# Altium footprint library custom-case.PcbLib: 342 footprints (part 14 of 22)
Each footprint in its own frame and in the unit in brackets; x right, y up, seen from the top. Pads: shape width x height; smd on the part's side, far side on the other; paste and mask are expansions set on the pad; w line width, h text height; cw(c..) or ccw(c..) is an arc to the next point about the centre after c.
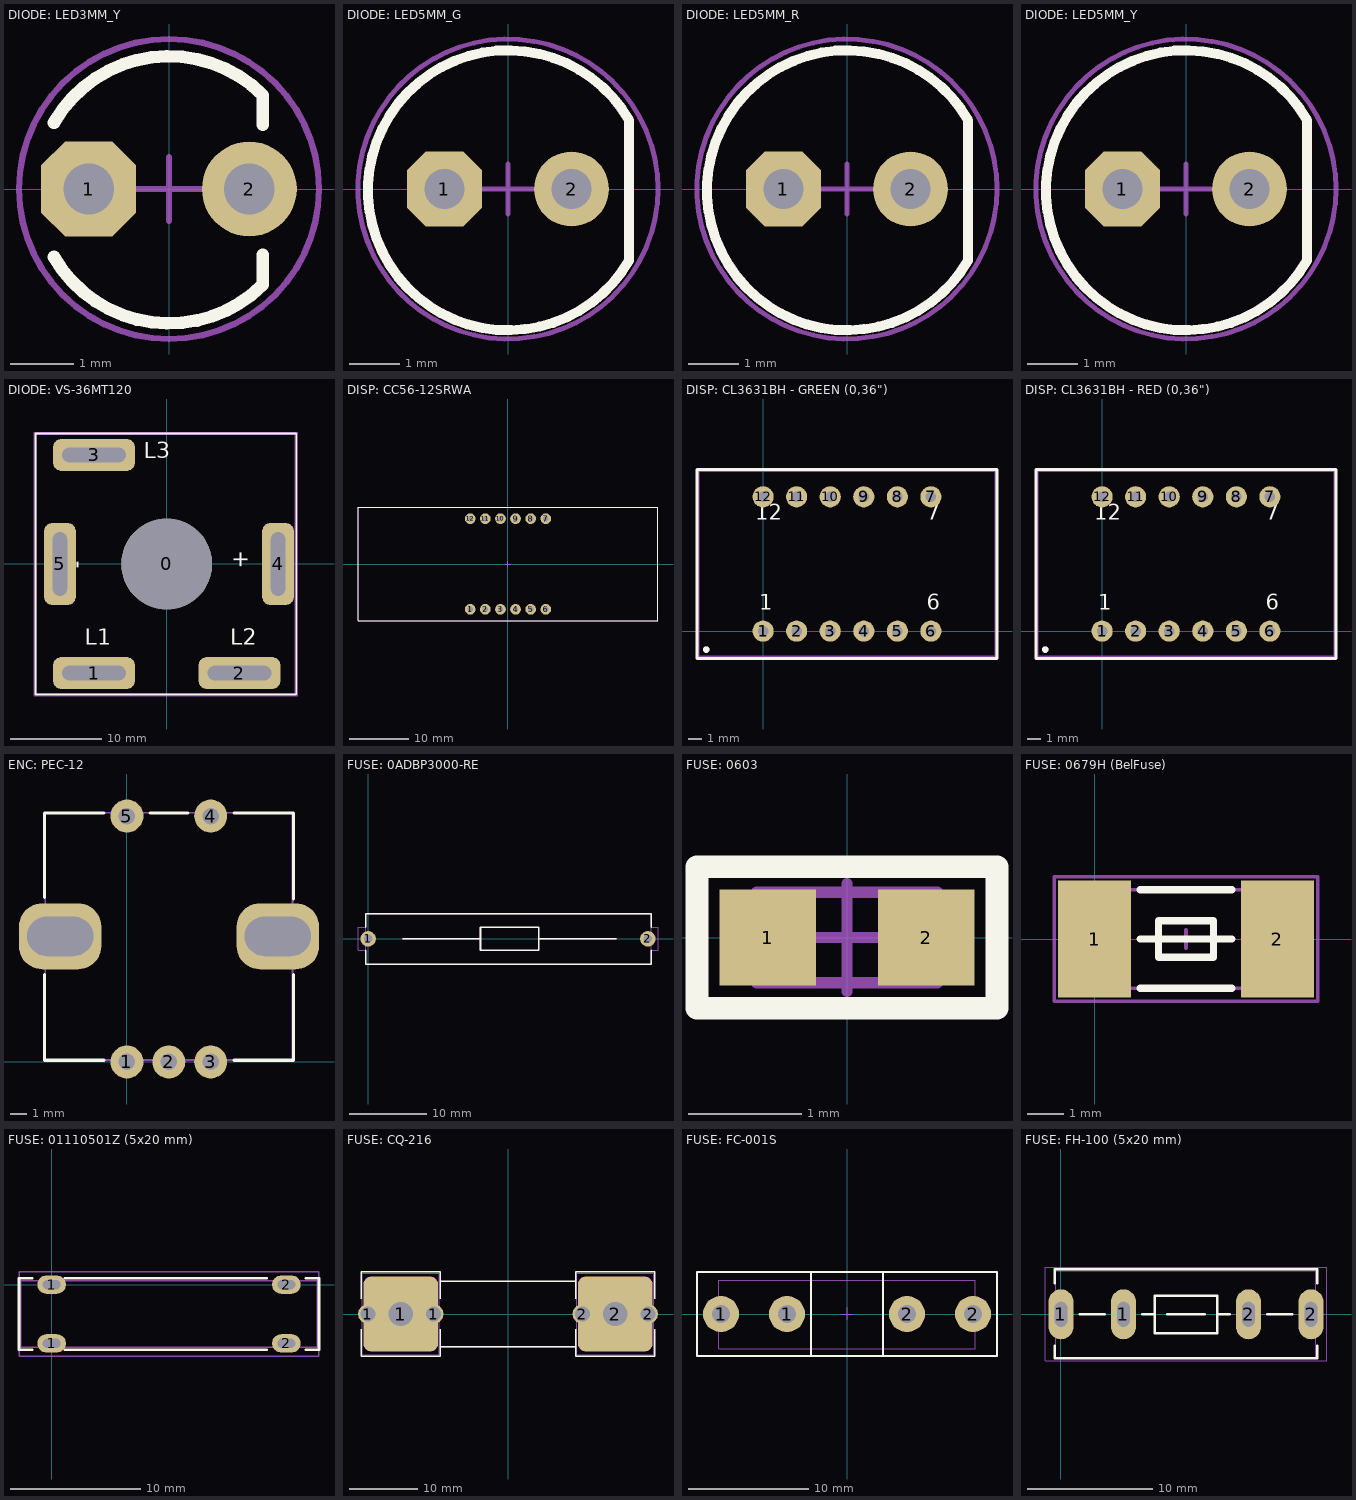
[diagram p13: the footprints below, top view; thin cyan lines are the x and y axes]

## DIODE: LED3MM_Y [mm] "Yellow Leaded Led, 3 mm"
height 12
pads (2):
  oct 1.5x1.5 hole 0.8: 1(-1.27,0)
  round 1.5 hole 0.8: 2(1.27,0)
Top Overlay:
  lines w0.2: 1.485,-1.51 cw(c0,-0.025) -1.819,-1.075 ccw(c0,-0.025) 1.485,-1.51 ; 1.485,-1.51 1.485,-1.04 1.485,-1.51 ; 1.485,1.485 ccw(c0,0) -1.819,1.05 cw(c0,0) 1.485,1.485 ; 1.485,1.485 1.485,1.015 1.485,1.485
Top Assy:
  circle w0.1: c0,0 r2.372
Size Area:
  circle w0.1: c0,0 r2.372
  lines w0.1: -0.5,0 0.5,0 ; 0,-0.5 0,0.5
3D body "3mm_led_yell.STEP": height 12, standoff -1, extent -2,-2 2,2

## DIODE: LED5MM_G [mm] "Green Leaded Led, 5 mm"
height 12
pads (2):
  oct 1.5x1.5 hole 0.8: 1(-1.27,0)
  round 1.5 hole 0.8: 2(1.27,0)
Top Overlay:
  lines w0.2: 2.425,-1.425 cw(c0,-0.025) 2.425,1.375 2.425,-1.425
Top Assy:
  circle w0.1: c0,0 r3
Size Area:
  circle w0.1: c0,0 r3
  lines w0.1: -0.5,0 0.5,0 ; 0,-0.5 0,0.5
3D body "5mm_led_grn.STEP": height 14.5, standoff -1, extent -3,-3 3,3

## DIODE: LED5MM_R [mm] "Red Leaded Led, 5 mm"
height 12
pads (2):
  oct 1.5x1.5 hole 0.8: 1(-1.27,0)
  round 1.5 hole 0.8: 2(1.27,0)
Top Overlay:
  lines w0.2: 2.425,-1.425 cw(c0,-0.025) 2.425,1.375 2.425,-1.425
Top Assy:
  circle w0.1: c0,0 r3
Size Area:
  circle w0.1: c0,0 r3
  lines w0.1: -0.5,0 0.5,0 ; 0,-0.5 0,0.5
3D body "5mm_led_red.STEP": height 14.5, standoff -1, extent -3,-3 3,3

## DIODE: LED5MM_Y [mm] "Yellow Leaded Led, 5 mm"
height 12
pads (2):
  oct 1.5x1.5 hole 0.8: 1(-1.27,0)
  round 1.5 hole 0.8: 2(1.27,0)
Top Overlay:
  lines w0.2: 2.425,-1.425 cw(c0,-0.025) 2.425,1.375 2.425,-1.425
Top Assy:
  circle w0.1: c0,0 r3
Size Area:
  circle w0.1: c0,0 r3
  lines w0.1: -0.5,0 0.5,0 ; 0,-0.5 0,0.5
3D body "5mm_led_yell.STEP": height 14.5, standoff -1, extent -3,-3 3,3

## DIODE: VS-36MT120 [mm]
pads (6):
  round 10 hole 10: 0(0,0)
  rrect50% 9x3.5 hole 1.6 slot 7 at 0 deg: 1(-8,-12) 2(8,-12) 3(-8,12)
  rrect50% 3.5x9 hole 1.6 slot 7 at 90 deg: 4(12.25,0) 5(-11.75,0)
Top Overlay:
  lines w0.2: -14.45,-14.35 14.25,-14.35 14.25,14.35 -14.45,14.35 -14.45,-14.35
  text "L1" at -9,-9.5 h3
  text "L3" at -2.5,11 h3
  text "L2" at 7,-9.5 h3
  text "+" at 9.5,-0.5 h3
  text "-" at -8.5,-0.5 h3
Top Assy:
  lines w0.1: -14.35,-14.25 -14.35,14.25 14.15,14.25 14.15,-14.25 -14.35,-14.25
Size Area:
  lines w0.1: -14.6,-14.5 -14.6,14.5 14.4,14.5 14.4,-14.5 -14.6,-14.5
3D body "D-63.stp": height 16, standoff -6, extent -14.35,-14.25 14.15,14.25

## DISP: CC56-12SRWA [mm]
height 8.1
pads (12):
  round 1.8 hole 0.9: 1(-6.35,-7.62) 2(-3.81,-7.62) 3(-1.27,-7.62) 4(1.27,-7.62) 5(3.81,-7.62) 6(6.35,-7.62) 7(6.35,7.62) 8(3.81,7.62) 9(1.27,7.62) 10(-1.27,7.62) 11(-3.81,7.62) 12(-6.35,7.62)
Top Overlay:
  lines w0.2: -25.2,-9.5 -25.2,9.5 25.2,9.5 25.2,-9.5 -25.2,-9.5
Top Assy:
  lines w0.1: -25.2,-9.5 -25.2,9.5 25.2,9.5 25.2,-9.5 -25.2,-9.5
Size Area:
  lines w0.1: -0.5,0 0.5,0 ; 0,-0.5 0,0.5 ; -25.2,-9.5 25.2,-9.5 25.2,9.5 -25.2,9.5 -25.2,-9.5
3D body "User Library-C-564 (7 segment 4 digit LED display).STEP": height 8, standoff -6.2, extent -25.2,-9.5 25.2,9.5

## DISP: CL3631BH - GREEN (0,36") [mm]
pads (14):
  round 1.6 hole 0.8: 1(0,0) 2(2.54,0) 3(5.08,0) 4(7.62,0) 5(10.16,0) 6(12.7,0) 7(12.7,10.16) 8(10.16,10.16) 9(7.62,10.16) 10(5.08,10.16) 11(2.54,10.16) 12(0,10.16)
  round 0.5 on Mech1: ""(-4.3,-1.4)
  round 0.5 on Top Overlay: ""(-4.3,-1.4)
Top Overlay:
  lines w0.2: -5,-2.075 -5,12.225 17.7,12.225 17.7,-2.075 -5,-2.075
  text "1" at -0.3,1.2 h2
  text "6" at 12.4,1.2 h2
  text "7" at 12.4,8 h2
  text "12" at -0.6,8 h2
Top Assy:
  lines w0.1: -4.85,-1.92 -4.85,12.08 17.55,12.08 17.55,-1.92 -4.85,-1.92
Size Area:
  lines w0.1: -4.95,-2.025 -4.95,12.175 17.65,12.175 17.65,-2.025 -4.95,-2.025
3D body "User Library-3631_Green_jam.STEP": height 7.1, standoff -5.5, extent -4.85,-1.92 17.55,12.08

## DISP: CL3631BH - RED (0,36") [mm]
pads (14):
  round 1.6 hole 0.8: 1(0,0) 2(2.54,0) 3(5.08,0) 4(7.62,0) 5(10.16,0) 6(12.7,0) 7(12.7,10.16) 8(10.16,10.16) 9(7.62,10.16) 10(5.08,10.16) 11(2.54,10.16) 12(0,10.16)
  round 0.5 on Mech1: ""(-4.3,-1.4)
  round 0.5 on Top Overlay: ""(-4.3,-1.4)
Top Overlay:
  lines w0.2: -5,-2.075 17.7,-2.075 17.7,12.225 -5,12.225 -5,-2.075
  text "12" at -0.6,8 h2
  text "7" at 12.4,8 h2
  text "6" at 12.4,1.2 h2
  text "1" at -0.3,1.2 h2
Top Assy:
  lines w0.1: -4.85,-1.92 17.55,-1.92 17.55,12.08 -4.85,12.08 -4.85,-1.92
Size Area:
  lines w0.1: -4.95,-2.025 17.65,-2.025 17.65,12.175 -4.95,12.175 -4.95,-2.025
3D body "User Library-3631_Red_jam.STEP": height 7.1, standoff -5.5, extent -4.85,-1.92 17.55,12.08

## ENC: PEC-12 [mm]
pads (7):
  round 2 hole 1: 1(0,0) 2(2.54,0) 3(5.08,0) 4(5.08,14.922) 5(0,14.922)
  rrect70% 5x4 hole 2.4 slot 4 at 0 deg: ""(-4.05,7.625) ""(9.15,7.625)
Top Overlay:
  lines w0.2: -5,5.3 -5,0.1 -1.4,0.1 ; -5,10 -5,15.1 -1.4,15.1 ; 1.4,15.1 3.7,15.1 ; 6.5,0.1 10.1,0.1 10.1,5.3 ; 6.5,15.1 10.1,15.1 10.1,9.9
Top Assy:
  lines w0.1: -4.966,0.12 10.046,0.12 10.046,15.12 -4.966,15.12 -4.966,0.12
3D body "User Library-rotacijski enkoder.STEP": height 16.5, standoff -4.53, extent -4.964,0.12 10.044,15.12

## FUSE: 0ADBP3000-RE [mm]
pads (2):
  round 2 hole 1.1: 1(0,0) 2(36.1,0)
Top Overlay:
  lines w0.2: -0.31,-1.5 -0.31,-3.3 36.51,-3.3 36.51,-1.5 ; -0.31,1.5 -0.31,3.25 36.51,3.25 36.51,1.5 ; 4.5,0 14.5,0 ; 22,0 32,0 ; 14.5,0 14.5,-1.5 22,-1.5 22,1.5 14.5,1.5 14.5,0
Top Assy:
  lines w0.1: 4.5,0 14.5,0 ; 22,0 32,0 ; 14.5,0 14.5,1.5 22,1.5 22,-1.5 14.5,-1.5 14.5,0 ; -0.31,-3.3 -0.31,3.25 36.51,3.25 36.51,-3.3 -0.31,-3.3
Size Area:
  lines w0.1: -1.3,-1.5 -0.31,-1.5 -0.31,-3.3 36.51,-3.3 36.51,-1.5 37.4,-1.5 37.4,1.5 36.51,1.5 36.51,3.25 -0.31,3.25 -0.31,1.5 -1.3,1.5 -1.3,-1.5
3D body "fuse.STEP": height 6.78, standoff -1.8, extent -0.31,-3.3 36.51,3.25

## FUSE: 0603 [mm]
pads (2):
  rect 0.85x0.85 smd: 1(-0.7,0) 2(0.7,0)
Top Overlay:
  lines w0.2: -1.325,-0.625 1.325,-0.625 1.325,0.625 -1.325,0.625 -1.325,-0.625
Top Assy:
  lines w0.1: -0.8,-0.4 0.8,-0.4 0.8,0.4 -0.8,0.4 -0.8,-0.4
Size Area:
  lines w0.1: -0.475,0 0.475,0 ; 0,-0.475 0,0.475 ; -1.325,-0.65 -1.325,0.625 1.325,0.625 1.325,-0.65 -1.325,-0.65
3D body "User Library-MF-FSMF020X_FUSE0603.STEP": height 0.53, standoff 0, extent -0.825,-0.425 0.825,0.425

## FUSE: 0679H (BelFuse) [mm]
pads (2):
  rect 2x3.2 smd mask+0.075: 1(0,0) 2(5,0)
Top Overlay:
  lines w0.2: 1.25,-1.35 3.75,-1.35 ; 1.25,0 3.75,0 ; 1.25,1.35 3.75,1.35 ; 1.75,-0.5 1.75,0.5 3.25,0.5 3.25,-0.5 1.75,-0.5
Top Assy:
  lines w0.1: -0.55,-1.35 -0.55,1.35 5.55,1.35 5.55,-1.35 -0.55,-1.35
Size Area:
  lines w0.1: 2.25,0 2.75,0 ; 2.5,-0.25 2.5,0.25 ; -1.1,-1.7 6.1,-1.7 6.1,1.7 -1.1,1.7 -1.1,-1.7
3D body "User Library-fuse smd.STEP": height 2.69, standoff 0, extent -0.55,-1.35 5.55,1.34

## FUSE: 01110501Z (5x20 mm) [mm]
pads (4):
  oval 2.2x1.4 hole 0.7 slot 1.35 at 0 deg: 1(0,-4.5) 1(0,0) 2(18,-4.5) 2(18,0)
Top Overlay:
  lines w0.2: -1.5,-5 -2.5,-5 -2.5,0.5 -1.5,0.5 ; 1,-5 16.5,-5 ; 1,0.5 16.5,0.5 ; 19.5,-5 20.5,-5 20.5,0.5 19.5,0.5
Top Assy:
  lines w0.1: 20.35,-4.8 -2.35,-4.8 -2.35,0.3 20.35,0.3 ; 20.35,-4.8 20.35,0.3 ; 20.35,-4.8 20.35,-4.8 ; 20.35,0.3 20.35,0.3
Size Area:
  lines w0.1: -2.5,-5.5 20.5,-5.5 20.5,1 -2.5,1 -2.5,-5.5
3D body "User Library-FUSIVEL.STEP": height 8.5, standoff 3.5, extent -1,-4.7 19,0.3
3D body "01110501Z.STEP": height 7.25, standoff -3.1, extent 15.55,-4.8 20.35,0.3
3D body "01110501Z.STEP": height 7.25, standoff -3.1, extent -2.35,-4.8 2.45,0.3

## FUSE: CQ-216 [mm]
pads (6):
  round 2.9 hole 2.2: 1(-20.65,0) 1(-10.95,0) 2(10.95,0) 2(20.65,0)
  rrect20% 11x11 / inner round 5.5 / far side round 5.5 hole 3.6: 1(-15.8,0) 2(15.8,0)
Top Overlay:
  lines w0.2: -21.65,-2.25 -21.65,-6.2 -9.95,-6.2 -9.95,-2.25 ; -21.65,2.25 -21.65,6.2 -9.95,6.2 -9.95,2.25 ; -9.95,-4.8 9.95,-4.8 ; -9.95,4.8 9.95,4.8 ; 9.95,-2.25 9.95,-6.2 21.65,-6.2 21.65,-2.25 ; 9.95,2.25 9.95,6.2 21.65,6.2 21.65,2.25
Mechanical 14:
  lines w0.1: -10.15,-4.8 10.15,-4.8 ; -10.15,4.8 10.15,4.8 ; -21.45,-6 -21.45,6 -10.15,6 -10.15,-6 -21.45,-6 ; 10.15,-6 10.15,6 21.45,6 21.45,-6 10.15,-6
3D body "FUSH_BUSSMANN_1A3400-09.stp": height 18, standoff -3.8, extent 10.25,-5.948 21.35,5.948
3D body "FUSH_BUSSMANN_1A3400-09.stp": height 18, standoff -3.8, extent -21.35,-5.948 -10.25,5.948
3D body "FUSE_10X38_H_Part1.stp": height 17.3, standoff 7, extent -19,-5.15 19,5.15
3D body "FUSE_10X38_H_Part2.stp": height 17, standoff 7.3, extent -9,-4.85 9,4.85

## FUSE: FC-001S [mm]
height 15
pads (4):
  round 3 hole 1.5: 1(-10.5,0) 1(-5,0) 2(5,0) 2(10.5,0)
Top Overlay:
  lines w0.2: -3,-3.5 -3,3.5 ; 3,-3.5 3,3.5 ; -12.5,-3.5 -12.5,3.5 12.5,3.5 12.5,-3.5 -12.5,-3.5
Top Assy:
  lines w0.1: -3,-2.9 -3,2.8 ; 3,-2.9 3,2.8 ; -10.7,-2.9 10.7,-2.9 10.7,2.8 -10.7,2.8 -10.7,-2.9
Size Area:
  lines w0.1: -0.5,0 0.5,0 ; 0,-0.5 0,0.5 ; -12.5,-3.5 -12.5,3.5 12.5,3.5 12.5,-3.5 -12.5,-3.5
3D body "FC-001S.STEP": height 5.5, standoff -2.81, extent -10.7,-2.9 10.7,2.798

## FUSE: FH-100 (5x20 mm) [mm]
pads (4):
  oval 2x4 hole 2 slot 1 at 0 deg: 1(0,0) 1(5,0) 2(15,0) 2(20,0)
Top Overlay:
  lines w0.2: -0.5,-2.5 -0.5,-3.5 20.5,-3.5 20.5,-2.5 ; -0.5,2.5 -0.5,3.6 20.5,3.6 20.5,2.5 ; 1.5,0 3.5,0 ; 6.5,0 7.5,0 ; 8.5,0 11.5,0 ; 12.5,0 13.5,0 ; 16.5,0 18.5,0 ; 7.5,-1.5 7.5,1.5 12.5,1.5 12.5,-1.5 7.5,-1.5
Top Assy:
  lines w0.1: 1.5,0 3.5,0 ; 6.5,0 7.5,0 ; 12.5,0 13.5,0 ; 16.5,0 18.5,0 ; 7.5,0 7.5,1.5 12.5,1.5 12.5,-1.5 7.5,-1.5 7.5,0 ; -0.4,-3.5 -0.4,3.5 20.4,3.5 20.4,-3.5 -0.4,-3.5
Size Area:
  lines w0.1: -1.25,-3.7 -1.25,3.75 21.25,3.75 21.25,-3.7 -1.25,-3.7
3D body "User Library-Clips FH-100 with fuse 5x20.STEP": height 9.99, standoff -3.5, extent -0.4,-3.5 20.4,3.5